# Altium schematic symbol library LED.SchLib: 55 symbols
Pins are listed as number, name and electrical type; pins without a type are passive.

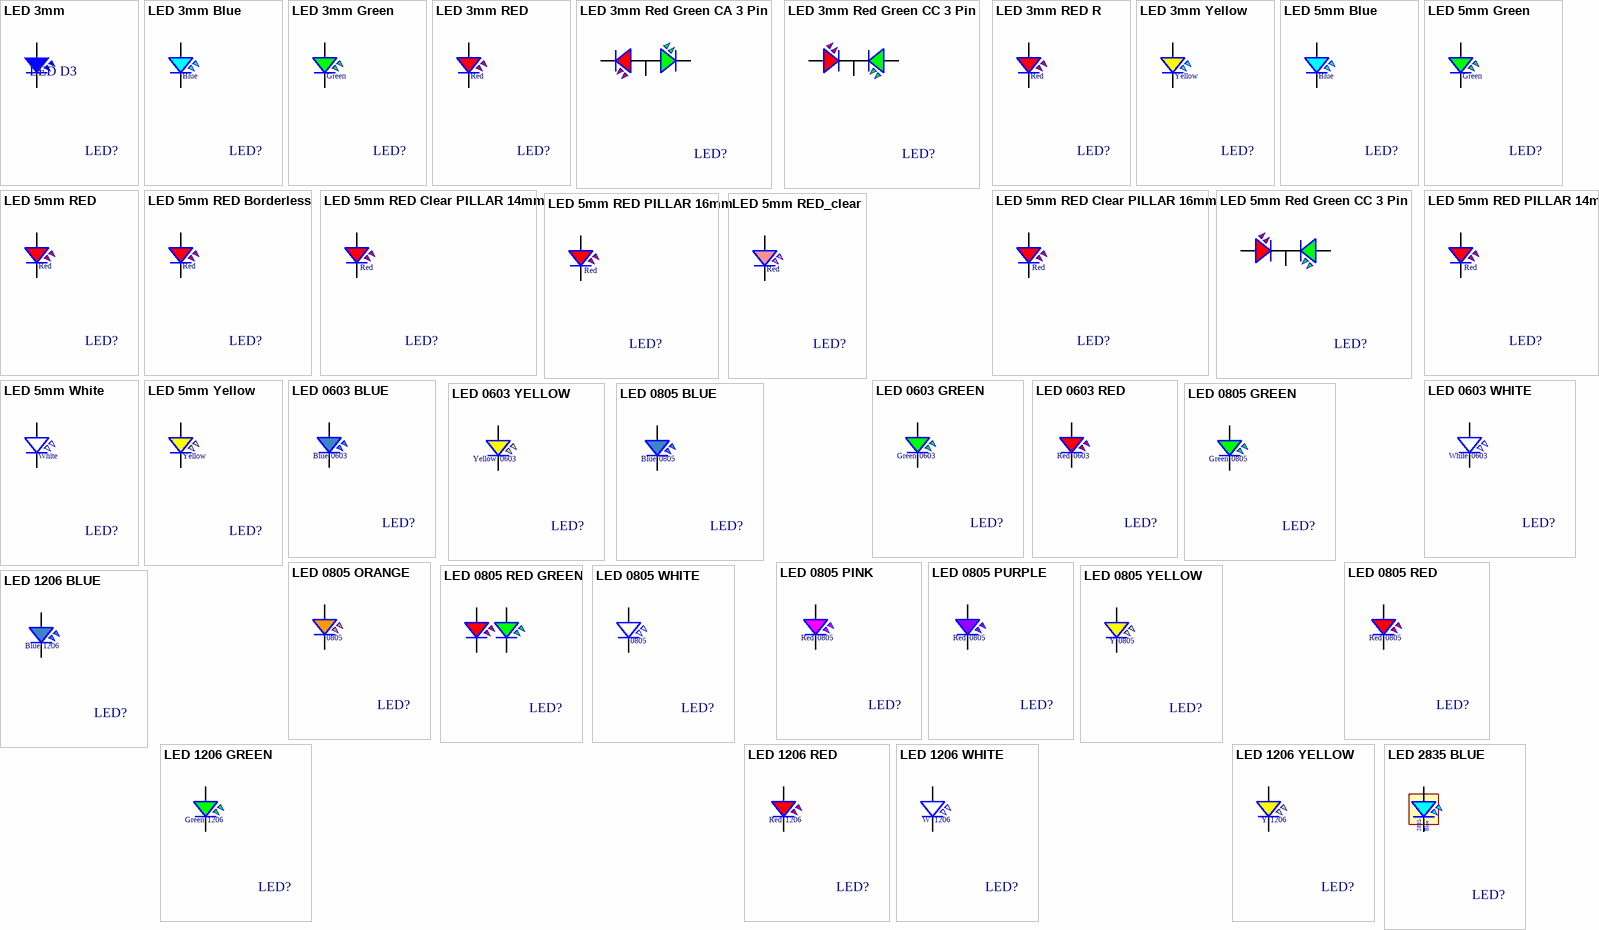
[diagram p0: symbols LED 3mm to LED 2835 BLUE]

## LED 3mm
designator LED?, comment LED D3
LED Single colour Green and Red; Value: LED 3 ly Single Colour
footprint LED_3MM_Blue
footprint LED_3MM_Green
footprint LED_3MM_RED
footprint LED_3MM_Yellow
pins: 1, 2

## LED 3mm Blue
designator LED?, comment LED D3 Blue  (value not drawn)
LED Single colour Blue 3mm; Code: 8001-043
footprint LED_3MM_Blue
pins: 1, 2
text: Blue

## LED 3mm Green
designator LED?, comment LED D3 Green  (value not drawn)
LED Single colour Green 3mm; Code: 8001-034
footprint LED_3MM_Green
footprint LED_3MM_Green_PILLAR
pins: 1, 2
text: Green

## LED 3mm RED
designator LED?, comment LED D3 Red  (value not drawn)
LED Single colour  Red 3mm; Code: 8001-015
footprint LED_3MM_RED
footprint LED_3MM_RED_PILLAR
pins: 1, 2
text: Red

## LED 3mm Red Green CA 3 Pin
designator LED?, comment Led R-G  (value not drawn)
LED 3mm Red Green CA 3 Pin; Code: 8001-037; Designed by: Nhox
footprint Led_3mm_3_Pin_CA
footprint Led_3mm_3_Pin_CA short
pins: 1, 2, 3

## LED 3mm Red Green CC 3 Pin
designator LED?, comment Led R-G  (value not drawn)
LED 3mm Red Green CC 3 Pin; Designed by: Nhox; Code: N/A
footprint Led_3mm_3_Pin_CC
pins: 1, 2, 3

## LED 3mm RED R
designator LED?, comment LED D3 Red  (value not drawn)
LED Single colour  Red 3mm; Code: 8001-015
footprint LED_3MM_RED_R
pins: 1, 2
text: Red

## LED 3mm Yellow
designator LED?, comment LED D3 Yellow  (value not drawn)
LED Single colour Yellow 3mm; Code: 8001-014
footprint LED_3MM_Yellow
pins: 1, 2
text: Yellow

## LED 5mm Blue
designator LED?, comment LED D5 Blue  (value not drawn)
LED Single colour; Code: 8001-008
footprint LED 5MM BLUE
pins: 1, 2
text: Blue

## LED 5mm Green
designator LED?, comment LED D5 Green  (value not drawn)
LED Single colour; Code: 8001-011
footprint LED 5MM GREEN
pins: 1, 2
text: Green

## LED 5mm RED
designator LED?, comment LED D5 Red  (value not drawn)
LED Single colour; Code: 8001-013
footprint LED 5mm RED
pins: 1, 2
text: Red

## LED 5mm RED Borderless
designator LED?, comment LED D5 Red  (value not drawn)
LED Single colour Borderless; Code: N/A
footprint LED 5mm RED Borderless
pins: 1, 2
text: Red

## LED 5mm RED Clear PILLAR 14mm
designator LED?, comment LED D5 Red  (value not drawn)
LED Single colour Red Clear, Pillar 14mm; Code: 8001-058; Code_sub1: 8001-062
footprint LED_RED_5MM_Clear_PILLAR_14mm (PILLAR 14mm)
pins: 1, 2
text: Red

## LED 5mm RED Clear PILLAR 16mm
designator LED?, comment LED D5 Red  (value not drawn)
LED Single colour Red Clear, Pillar 16mm; Code: 8001-051; Code_sub1: 8001-050
footprint LED_RED_5MM_Clear_PILLAR (PILLAR 16mm)
pins: 1, 2
text: Red

## LED 5mm Red Green CC 3 Pin
designator LED?, comment Led R-G  (value not drawn)
LED 5mm Red Green CC 3 Pin; Code: N/A
footprint Led_5mm_3_Pin_CC
pins: 1, 2, 3

## LED 5mm RED PILLAR 14mm
designator LED?, comment LED D5 Red  (value not drawn)
LED Single colour Red, Pillar 14mm; Code: 8001-013-1; Code_sub1: 8001-062
footprint LED_RED_5MM_PILLAR_14mm (PILLAR 14mm)
pins: 1, 2
text: Red

## LED 5mm RED PILLAR 16mm
designator LED?, comment LED D5 Red  (value not drawn)
LED Single colour Red, Pillar 16mm; Code: 8001-013; Code_sub1: 8001-050
footprint LED_RED_5MM_PILLAR (PILLAR 16mm)
pins: 1, 2
text: Red

## LED 5mm RED_clear
designator LED?, comment LED D5 Red_clear  (value not drawn)
LED _clear Single colour  Red 3mm; Code: 8001-060
footprint LED 5mm WHITE
pins: 1, 2
text: Red

## LED 5mm White
designator LED?, comment LED D5 White  (value not drawn)
LED Single colour; Code: 8001-026
footprint LED 5mm WHITE
pins: 1, 2
text: White

## LED 5mm Yellow
designator LED?, comment LED D5 Yellow  (value not drawn)
LED Single colour; Code: 8001-012
footprint LED 5MM YELLOW
pins: 1, 2
text: Yellow

## LED 0603 BLUE
designator LED?, comment LED BLUE  (value not drawn)
LED 0603 SMD BLUE; Designed by: nhox; Code: N/A
footprint LED0603BLU (LED SMD 0603, BLUE)
pins: 1, 2
text: Blue; 0603

## LED 0603 GREEN
designator LED?, comment LED GREEN  (value not drawn)
LED 0603 SMD GREEN; Designed by: nhox; Code: N/A
footprint LED0603GRN (LED SMD 0603, GREEN)
pins: 1, 2
text: Green; 0603

## LED 0603 RED
designator LED?, comment LED RED  (value not drawn)
LED 0603 SMD RED; Code: 8600-033; Designed by: nhox
footprint LED0603RED (LED SMD 0603, RED)
pins: 1, 2
text: Red; 0603

## LED 0603 WHITE
designator LED?, comment LED WHITE  (value not drawn)
LED 0603 SMD WHITE; Code: 8600-036; Designed by: nhox
footprint LED0603WHI (LED SMD 0603, RED)
pins: 1, 2
text: White; 0603

## LED 0603 YELLOW
designator LED?, comment LED YELLOW  (value not drawn)
LED 0603 SMD YELLOW; Designed by: nhox; Code: N/A
footprint LED0603YLW (LED SMD 0603, YELLOW)
pins: 1, 2
text: Yellow; 0603

## LED 0805 BLUE
designator LED?, comment LED BLUE  (value not drawn)
LED 0805 SMD BLUE; Code: 8600-019; Designed by: TranLuyen
footprint LED 0805 Blue
pins: 1, 2
text: Blue; 0805

## LED 0805 GREEN
designator LED?, comment LED GREEN  (value not drawn)
LED 0805 SMD GREEN; Code: 8600-027; Designed by: TranLuyen
footprint LED 0805 Green
pins: 1, 2
text: Green; 0805

## LED 0805 ORANGE
designator LED?, comment LED ORANGE  (value not drawn)
LED 0805 SMD ORANGE; Code: N/A; Link: https://jlcpcb.com/partdetail/EverlightElec-17_21SURC_S530_A3TR8/C72037
footprint LED 0805 Orange
pins: 1, 2
text: 0805

## LED 0805 PINK
designator LED?, comment LED PINK  (value not drawn)
LED 0805 SMD RED; Code: N/A
footprint LED 0805 Pink
pins: 1, 2
text: Red; 0805

## LED 0805 PURPLE
designator LED?, comment LED PURPLE  (value not drawn)
LED 0805 SMD RED; Code: N/A
footprint LED 0805 PURPLE
pins: 1, 2
text: Red; 0805

## LED 0805 RED
designator LED?, comment LED RED  (value not drawn)
LED 0805 SMD RED; Code: 8600-017; Designed by: TranLuyen
footprint LED 0805 Red
pins: 1, 2
text: Red; 0805

## LED 0805 RED GREEN
designator LED?, comment LED RG  (value not drawn)
LED 0805 SMD RED GREEN; Designed by: Nhox; Code: N/A
footprint LED0805RedGreen
pins: 1, 2, 3, 4

## LED 0805 WHITE
designator LED?, comment LED WHITE  (value not drawn)
LED 0805 SMD WHITE; Code: N/A; Link: https://jlcpcb.com/partdetail/Hubei_KentoElec-C34499/C34499
footprint LED 0805 Blue
pins: 1, 2
text: 0805

## LED 0805 YELLOW
designator LED?, comment LED YELLOW  (value not drawn)
LED 0805 SMD; Designed by: TranLuyen; Code: N/A
footprint LED 0805 Yellow
pins: 1, 2
text: Y; 0805

## LED 1206 BLUE
designator LED?, comment LED BLUE  (value not drawn)
LED 1206 SMD BLUE; Designed by: TranLuyen; Code: N/A
footprint LED1206BLU (LED, 1206, BLUE)
pins: 1, 2
text: Blue; 1206

## LED 1206 GREEN
designator LED?, comment LED GREEN  (value not drawn)
LED 1206 SMD GREEN; Designed by: TranLuyen; Code: N/A
footprint LED1206GRN (LED, 1206, GREEN)
pins: 1, 2
text: Green; 1206

## LED 1206 RED
designator LED?, comment LED RED  (value not drawn)
LED 1206 SMD RED; Designed by: TranLuyen; Code: N/A
footprint LED1206RED (LED, 1206, RED)
pins: 1, 2
text: Red; 1206

## LED 1206 WHITE
designator LED?, comment LED WHITE  (value not drawn)
LED 1206 SMD WHITE; Code: N/A
footprint LED1206WHT (LED, 1206, WHITE)
pins: 1, 2
text: W; 1206

## LED 1206 YELLOW
designator LED?, comment LED YELLOW  (value not drawn)
LED 1206 SMD; Designed by: TranLuyen; Code: N/A
footprint LED1206YLW (LED, 1206, YELLOW)
pins: 1, 2
text: Y; 1206

## LED 2835 BLUE
designator LED?  (value not drawn)
Middle Power LED Series / 2835 0.5W Room Temp; Code: N/A
footprint LED2835 - BLUE
pins: 1, 2
text: 2835; Blue

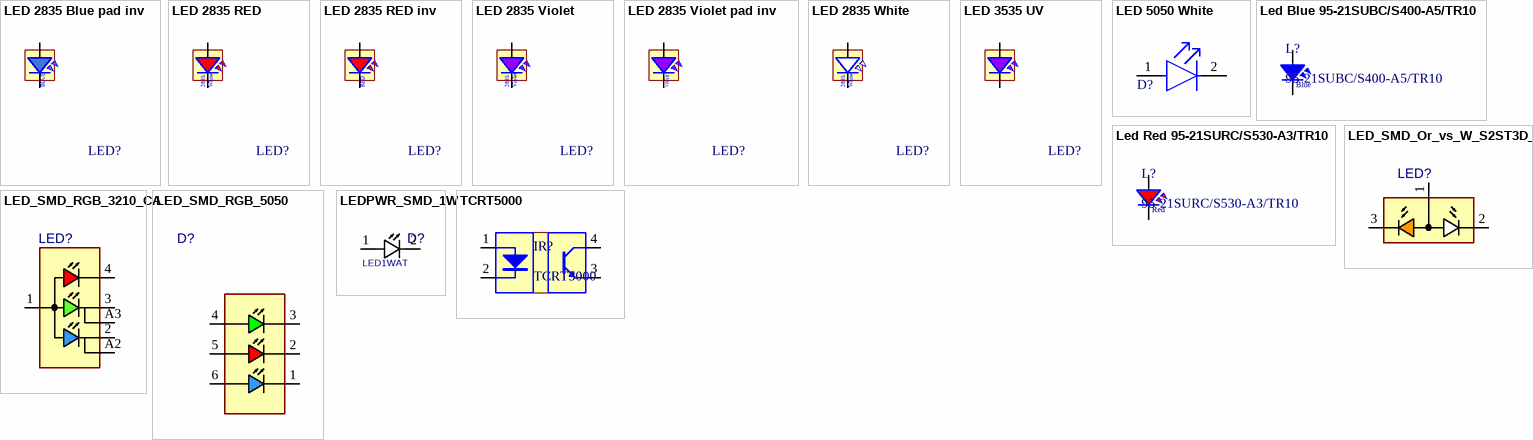
[diagram p1: symbols LED 2835 Blue pad inv to TCRT5000]

## LED 2835 Blue pad inv
designator LED?, comment LED BLUE  (value not drawn)
LED blue -  BIN code: B031B28A21 / PART NO: RA32A1-BNU-FR. 440nm; Code: N/A
footprint LED2835 - blue pad inv
pins: 1, 2
text: BLUE

## LED 2835 RED
designator LED?  (value not drawn)
Middle Power LED Series / 2835 0.5W Room Temp; Code: N/A
footprint LED2835 - RED
pins: 1, 2
text: 2835; White

## LED 2835 RED inv
designator LED?, comment LED RED  (value not drawn)
60mA, 1.8-2V RED, BIN code: R111B25B05 / PART NO: RA32E1-RUT-FR-J. 660nm; Code: N/A
footprint LED2835 - red pad inv
pins: 1, 2
text: RED

## LED 2835 Violet
designator LED?, comment LED 2835 White  (value not drawn)
Middle Power LED Series / 2835 0.5W Room Temp; Code: N/A
footprint LED2835 - VIOLET
pins: 1, 2
text: 2835; Violet

## LED 2835 Violet pad inv
designator LED?, comment LED Violet  (value not drawn)
60mA, 1.8-2V violed, BIN code: R251B26B05 / PART NO: RA32E1-IRT-FR. 730nm; Code: N/A
footprint LED2835 - violet pad inv
pins: 1, 2
text: VIOLET

## LED 2835 White
designator LED?, comment L2835 White  (value not drawn)
LED 2835 3V 0.5W LM281B+; Code: N/A
footprint LED2835 (LM281+ RA90 4000K)
pins: 1, 2
text: 2835; White

## LED 3535 UV
designator LED?  (value not drawn)
LED UV / 3535 3W; Code: N/A
footprint 3535
pins: 1, 2

## LED 5050 White
designator D?, comment 5050 While  (value not drawn)
footprint LED 5050 1 color
pins: 1 A, 2 K

## Led Blue 95-21SUBC/S400-A5/TR10
designator L?, comment 95-21SUBC/S400-A5/TR10
95-21SUBC/S400-A5/TR10, Vf = 3.5V, Vf max = 4.3V, If = 20mA, Pd = 95mW
footprint Led 95-21SU
pins: 1, 2
text: Blue

## Led Red 95-21SURC/S530-A3/TR10
designator L?, comment 95-21SURC/S530-A3/TR10
95-21SURC/S530-A3/TR10, Vf = 2V, Vf max = 2.4V, If = 20mA, Pd = 60mW
footprint Led 95-21SU
pins: 1, 2
text: Red

## LED_SMD_Or_vs_W_S2ST3D_CA
designator LED?, comment LED-Or_vs_W  (value not drawn)
LED, Or_vs_W, COMMON ANODE; Code: N/A
footprint S2ST3D (LED S2ST3D 3.2mmX1.0mm)
pins: 1 ANODE, 2 White, 3 Orange

## LED_SMD_RGB_3210_CA
designator LED?, comment LED-RGB  (value not drawn)
LED, SMD, RGB COMMON ANODE; Code: N/A
footprint LED3210RGB (LED RGB 3.2mmX1.0mm)
pins: 1 ANODE, 2 BLUE, 3 GREEN, 4 RED, A2 BLUE, A3 GREEN

## LED_SMD_RGB_5050
designator D?, comment 5050RGB  (value not drawn)
LED, SMD, RGB 5050; Code: 8600-024; Designed by: TranLuyen; LCSC Part: C440459
footprint LED5050RGB_6 (LED 5mmX5mm, PLLC6)
pins: 1 RED, 2 GRN, 3 BLU, 4 AB, 5 AG, 6 AR

## LEDPWR_SMD_1W
designator D?, comment LED1WAT
LED, POWER,SMD, 1WATT; PARAM2: 3V; VALUE: LED1WAT
footprint LED1WAT (LED, 1WATT)
pins: 1 ANODE, 2 CATHODE

## TCRT5000
designator IR?
10.2 x 5.8 x 7mm, TCRT5000; Code: M-6104-002; Designed by: Nhox
footprint TCRT5000
pins: 1 A "Anode", 2 K "Cathode", 3 E "Emitter", 4 C "Collector"